# Altium schematic symbol library C0402C104J4RAC.SchLib: 1 symbol
Pins are listed as number, name and electrical type; pins without a type are passive.

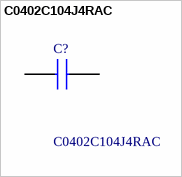
[diagram p0: symbol C0402C104J4RAC]

## C0402C104J4RAC
designator C?
Multilayer Ceramic Capacitors MLCC - SMD/SMT 16volts 0.1uF 5% X7R; Manufacturer_Name: Yageo Group; Geometry.Height: 0.55mm; Mouser Part Number: 80-C0402C104J4RAC; Mouser Price/Stock: https://www.mouser.co.uk/ProductDetail/KEMET/C0402C104J4RAC?qs=kP14MTe6w4LoDChw2h9e8Q%3D%3D; Manufacturer_Part_Number: C0402C104J4RAC; Datasheet Link: https://content.kemet.com/datasheets/KEM_C1002_X7R_SMD.pdf
footprint C0402C104J4RACTU
pins: 1, 2